# Altium footprint library E0515S-1WR3.PcbLib: 1 footprints
Each footprint in its own frame and in the unit in brackets; x right, y up, seen from the top. Pads: shape width x height; smd on the part's side, far side on the other; paste and mask are expansions set on the pad; w line width, h text height; cw(c..) or ccw(c..) is an arc to the next point about the centre after c.
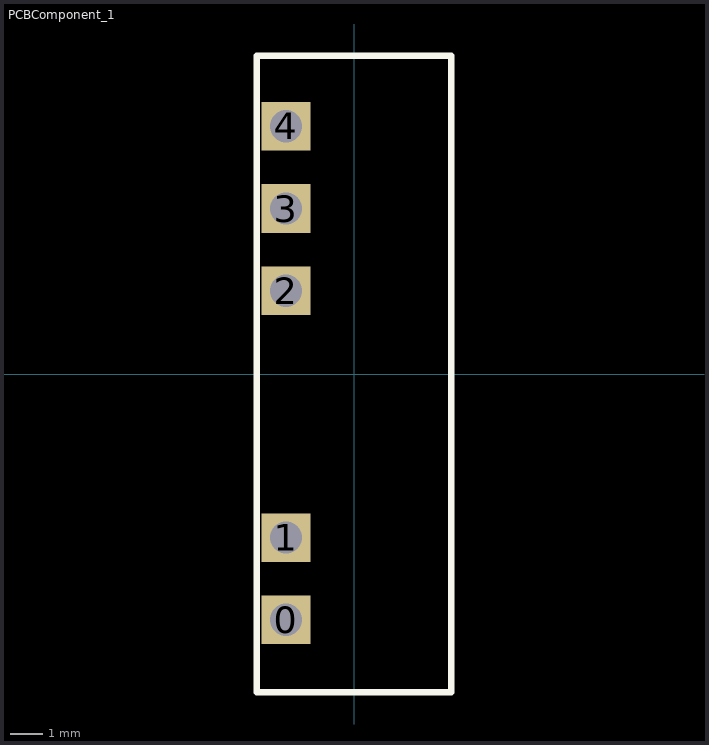
[diagram p0: the footprint, top view; thin cyan lines are the x and y axes]

## PCBComponent_1 [mm]
pads (5):
  rect 1.5x1.5 hole 1: 0(-2.1,-7.59) 1(-2.1,-5.05) 2(-2.1,2.57) 3(-2.1,5.11) 4(-2.1,7.65)
Top Overlay:
  lines w0.2: -3,-9.825 -3,9.825 3,9.825 3,-9.825 -3,-9.825